# Altium footprint library Miscellaneous Header.PcbLib: 164 footprints (part 5 of 11)
Each footprint in its own frame and in the unit in brackets; x right, y up, seen from the top. Pads: shape width x height; smd on the part's side, far side on the other; paste and mask are expansions set on the pad; w line width, h text height; cw(c..) or ccw(c..) is an arc to the next point about the centre after c.
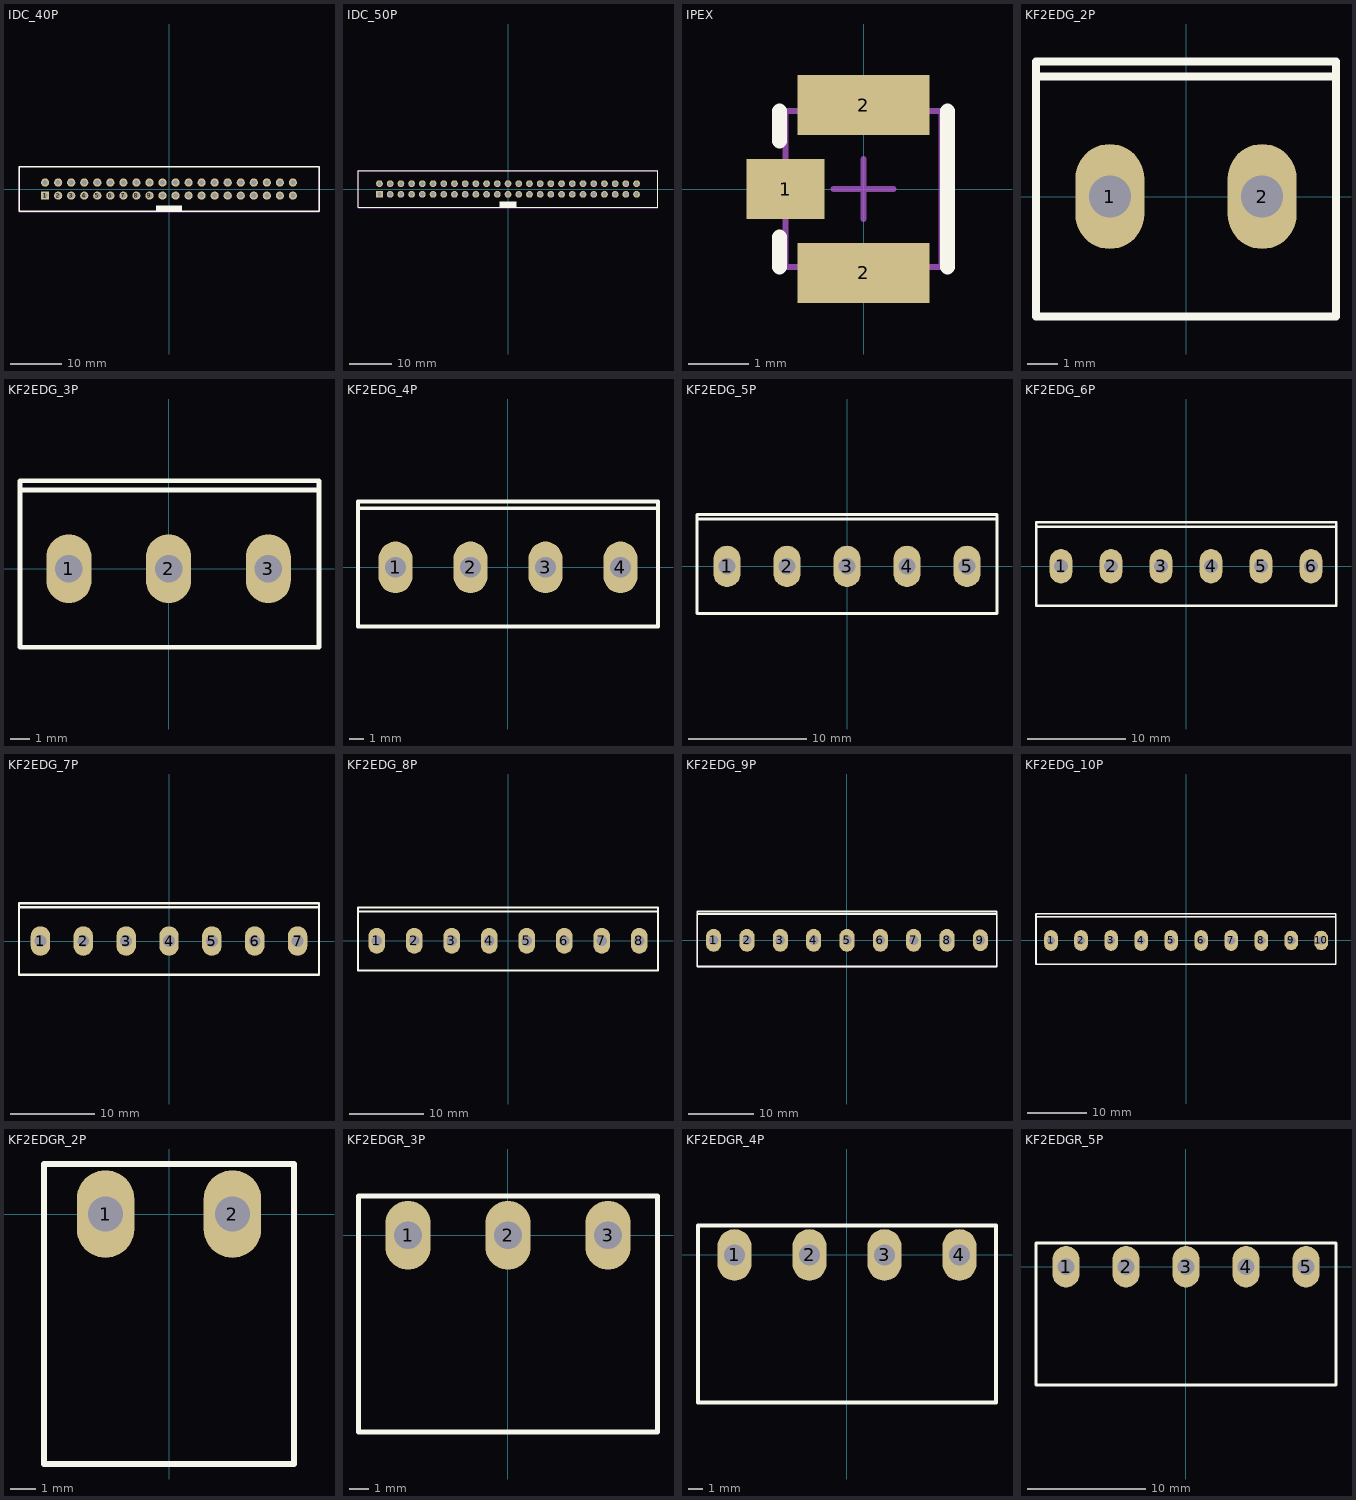
[diagram p4: the footprints below, top view; thin cyan lines are the x and y axes]

## IDC_40P [mm]
pads (40):
  rect 1.6x1.6 hole 1: 1(-24.13,-1.27)
  round 1.6 hole 1: 2(-21.59,-1.27) 3(-19.05,-1.27) 4(-16.51,-1.27) 5(-13.97,-1.27) 6(-11.43,-1.27) 7(-8.89,-1.27) 8(-6.35,-1.27) 9(-3.81,-1.27) 10(-1.27,-1.27) 11(1.27,-1.27) 12(3.81,-1.27) 13(6.35,-1.27) 14(8.89,-1.27) 15(11.43,-1.27) 16(13.97,-1.27) 17(16.51,-1.27) 18(19.05,-1.27) 19(21.59,-1.27) 20(24.13,-1.27) 21(24.13,1.27) 22(21.59,1.27) 23(19.05,1.27) 24(16.51,1.27) 25(13.97,1.27) 26(11.43,1.27) 27(8.89,1.27) 28(6.35,1.27) 29(3.81,1.27) 30(1.27,1.27) 31(-1.27,1.27) 32(-3.81,1.27) 33(-6.35,1.27) 34(-8.89,1.27) 35(-11.43,1.27) 36(-13.97,1.27) 37(-16.51,1.27) 38(-19.05,1.27) 39(-21.59,1.27) 40(-24.13,1.27)
Top Overlay:
  rectangle: -2.5,-4.3 2.5,-3.2
  lines w0.254: -29.22,-4.3 29.21,-4.3 29.21,4.3 -29.22,4.3 -29.22,-4.3
Mechanical 15:
  lines w0.1: -29.21,-4.45 29.21,-4.45 29.21,4.475 -29.21,4.475 -29.21,-4.45
3D body: height 9.5, standoff -2.6, extent -29.3,-4.6 29.3,4.7

## IDC_50P [mm]
pads (50):
  rect 1.6x1.6 hole 1: 1(-30.48,-1.27)
  round 1.6 hole 1: 2(-27.94,-1.27) 3(-25.4,-1.27) 4(-22.86,-1.27) 5(-20.32,-1.27) 6(-17.78,-1.27) 7(-15.24,-1.27) 8(-12.7,-1.27) 9(-10.16,-1.27) 10(-7.62,-1.27) 11(-5.08,-1.27) 12(-2.54,-1.27) 13(0,-1.27) 14(2.54,-1.27) 15(5.08,-1.27) 16(7.62,-1.27) 17(10.16,-1.27) 18(12.7,-1.27) 19(15.24,-1.27) 20(17.78,-1.27) 21(20.32,-1.27) 22(22.86,-1.27) 23(25.4,-1.27) 24(27.94,-1.27) 25(30.48,-1.27) 26(30.48,1.27) 27(27.94,1.27) 28(25.4,1.27) 29(22.86,1.27) 30(20.32,1.27) 31(17.78,1.27) 32(15.24,1.27) 33(12.7,1.27) 34(10.16,1.27) 35(7.62,1.27) 36(5.08,1.27) 37(2.54,1.27) 38(0,1.27) 39(-2.54,1.27) 40(-5.08,1.27) 41(-7.62,1.27) 42(-10.16,1.27) 43(-12.7,1.27) 44(-15.24,1.27) 45(-17.78,1.27) 46(-20.32,1.27) 47(-22.86,1.27) 48(-25.4,1.27) 49(-27.94,1.27) 50(-30.48,1.27)
Top Overlay:
  rectangle: -2,-4.3 2,-3
  lines w0.254: -35.57,-4.3 35.56,-4.3 35.56,4.3 -35.57,4.3 -35.57,-4.3
Mechanical 15:
  lines w0.1: -35.56,-4.45 35.56,-4.45 35.56,4.45 -35.56,4.45 -35.56,-4.45
3D body: height 9.24, standoff -2.9, extent -35.56,-4.45 35.6,4.75

## IPEX [mm]
pads (3):
  rect 1.3x1 smd: 1(-1.3,0)
  rect 2.2x1 smd: 2(0,-1.4) 2(0,1.4)
Top Overlay:
  lines w0.254: -1.4,-1.3 -1.4,-0.8 ; -1.4,0.8 -1.4,1.3 ; 1.4,-1.3 1.4,1.3
Mechanical 15:
  lines w0.1: -0.5,0 0.5,0 ; 0,-0.5 0,0.5 ; -1.3,-1.3 1.3,-1.3 1.3,1.3 -1.3,1.3 -1.3,-1.3
3D body: height 1.25, standoff 0, extent -1.55,-1.5 1.55,1.5

## KF2EDG_2P [mm]
pads (2):
  oval 2.3x3.5 hole 1.4: 1(-2.54,0) 2(2.54,0)
Top Overlay:
  lines w0.254: -5,4 -5,4.5 5,4.5 5,4 ; -5,4 -5,-4 5,-4 5,4 ; -5,4 5,4
Mechanical 15:
  lines w0.1: -5,-4 5,-4 5,4 -5,4 -5,-4
3D body: height 12, standoff -2.5, extent -5,-4 5,4.471

## KF2EDG_3P [mm]
pads (3):
  oval 2.3x3.5 hole 1.4: 1(-5.08,0) 2(0,0) 3(5.08,0)
Top Overlay:
  lines w0.254: 7.66,4 -7.58,4 ; -7.58,4 -7.58,4.48 7.66,4.48 7.66,-4 -7.58,-4 -7.58,4
Mechanical 15:
  lines w0.1: -7.62,-4 7.62,-4 7.62,4 -7.62,4 -7.62,-4
3D body: height 12, standoff -2.5, extent -7.62,-4 7.62,4.471

## KF2EDG_4P [mm]
pads (4):
  oval 2.3x3.5 hole 1.4: 1(-7.62,0) 2(-2.54,0) 3(2.54,0) 4(7.62,0)
Top Overlay:
  lines w0.254: 10.16,4 -10.16,4 ; -10.16,4 -10.16,-4 10.16,-4 10.16,4.46 -10.16,4.46 -10.16,4
Mechanical 15:
  lines w0.1: -10.16,-4 10.16,-4 10.16,4 -10.16,4 -10.16,-4
3D body: height 12, standoff -2.5, extent -10.16,-4 10.16,4.471

## KF2EDG_5P [mm]
pads (5):
  oval 2.3x3.5 hole 1.4: 1(-10.16,0) 2(-5.08,0) 3(0,0) 4(5.08,0) 5(10.16,0)
Top Overlay:
  lines w0.254: 12.7,4 -12.7,4 ; -12.7,4 -12.7,-4 12.7,-4 12.7,4.4 -12.7,4.4 -12.7,4
Mechanical 15:
  lines w0.1: -12.7,-4 -12.7,4 12.7,4 12.7,-4 -12.7,-4
3D body: height 12, standoff -2.5, extent -12.7,-4 12.7,4.471

## KF2EDG_6P [mm]
pads (6):
  oval 2.3x3.5 hole 1.4: 1(-12.7,0) 2(-7.62,0) 3(-2.54,0) 4(2.54,0) 5(7.62,0) 6(12.7,0)
Top Overlay:
  lines w0.254: 15.24,4 -15.24,4 ; -15.24,4 -15.24,-4 15.24,-4 15.24,4.46 -15.24,4.46 -15.24,4
Mechanical 15:
  lines w0.1: -15.24,-4 -15.24,4 15.24,4 15.24,-4 -15.24,-4
3D body: height 12, standoff -2.5, extent -15.24,-4 15.24,4.471

## KF2EDG_7P [mm]
pads (7):
  oval 2.3x3.5 hole 1.4: 1(-15.24,0) 2(-10.16,0) 3(-5.08,0) 4(0,0) 5(5.08,0) 6(10.16,0) 7(15.24,0)
Top Overlay:
  lines w0.254: 17.78,4 -17.78,4 ; -17.78,4 -17.78,4.48 17.78,4.48 17.78,-4 -17.78,-4 -17.78,4
Mechanical 15:
  lines w0.1: -17.78,-4 17.78,-4 17.78,4 -17.78,4 -17.78,-4
3D body: height 12, standoff -2.5, extent -17.78,-4 17.78,4.471

## KF2EDG_8P [mm]
pads (8):
  oval 2.3x3.5 hole 1.4: 1(-17.78,0) 2(-12.7,0) 3(-7.62,0) 4(-2.54,0) 5(2.54,0) 6(7.62,0) 7(12.7,0) 8(17.78,0)
Top Overlay:
  lines w0.254: -20.32,4.48 -20.32,4 ; -20.3,4.5 20.32,4.5 20.32,-4 -20.32,-4 -20.32,4 ; 20.32,4 -20.32,4
Mechanical 15:
  lines w0.1: -20.32,-4 -20.32,4 20.32,4 20.32,-4 -20.32,-4
3D body: height 12, standoff -2.5, extent -20.32,-4 20.32,4.471

## KF2EDG_9P [mm]
pads (9):
  oval 2.3x3.5 hole 1.4: 1(-20.32,0) 2(-15.24,0) 3(-10.16,0) 4(-5.08,0) 5(0,0) 6(5.08,0) 7(10.16,0) 8(15.24,0)
  oval 2.3x3.3 hole 1.4: 9(20.32,0)
Top Overlay:
  lines w0.254: 22.8,4 -22.8,4 ; -22.8,4 -22.8,-4 22.8,-4 22.8,4.4 -22.8,4.4 -22.8,4
Mechanical 15:
  lines w0.1: -22.86,-4 22.86,-4 22.86,4 -22.86,4 -22.86,-4
3D body: height 12.1, standoff -4.5, extent -22.86,-3.8 22.86,4.4

## KF2EDG_10P [mm]
pads (10):
  oval 2.3x3.5 hole 1.4: 1(-22.86,0) 2(-17.78,0) 3(-12.7,0) 4(-7.62,0) 5(-2.54,0) 6(2.54,0) 7(7.62,0) 8(12.7,0)
  oval 2.3x3.3 hole 1.4: 9(17.78,0) 10(22.86,0)
Top Overlay:
  lines w0.254: 25.3,4 -25.4,4 ; -25.4,4 -25.4,4.5 25.3,4.5 25.3,-4 -25.4,-4 -25.4,4
Mechanical 15:
  lines w0.1: -25.4,-4 25.36,-4 25.36,4 -25.4,4 -25.4,-4
3D body: height 12.1, standoff -4.5, extent -25.4,-3.725 25.4,4.475

## KF2EDGR_2P [mm]
pads (2):
  oval 2.3x3.5 hole 1.4: 1(-2.54,0) 2(2.54,0)
Top Overlay:
  lines w0.254: -5,-10 5,-10 5,2 -5,2 -5,-10
Mechanical 15:
  lines w0.1: -5.08,-10 -5.08,2 5.08,2 5.08,-10 -5.08,-10
3D body: height 8.6, standoff -3.5, extent -5.08,-10 5.08,2.002

## KF2EDGR_3P [mm]
pads (3):
  oval 2.3x3.5 hole 1.4: 1(-5.08,0) 2(0,0) 3(5.08,0)
Top Overlay:
  lines w0.254: -7.6,-10 -7.6,2 7.6,2 7.6,-10 -7.6,-10
Mechanical 15:
  lines w0.1: -7.62,-10 -7.62,2 7.62,2 7.62,-10 -7.62,-10
3D body: height 8.7, standoff -3.4, extent -7.62,-10.002 7.62,2

## KF2EDGR_4P [mm]
pads (4):
  oval 2.3x3.5 hole 1.4: 1(-7.62,0) 2(-2.54,0) 3(2.54,0) 4(7.62,0)
Top Overlay:
  lines w0.254: -10.1,-10 -10.1,2 10.1,2 10.1,-10 -10.1,-10
Mechanical 15:
  lines w0.1: -10.16,-10 10.16,-10 10.16,2 -10.16,2 -10.16,-10
3D body: height 8.6, standoff -3.5, extent -10.16,-10.002 10.16,2

## KF2EDGR_5P [mm]
pads (5):
  oval 2.3x3.5 hole 1.4: 1(-10.16,0) 2(-5.08,0) 3(0,0) 4(5.08,0) 5(10.16,0)
Top Overlay:
  lines w0.254: -12.7,-10 12.7,-10 12.7,2 -12.7,2 -12.7,-10
Mechanical 15:
  lines w0.1: -12.7,-10 -12.7,2 12.7,2 12.7,-10 -12.7,-10
3D body: height 8.6, standoff -3.5, extent -12.7,-10.002 12.7,2